# Altium schematic symbol library cp2102n-a01-gqfn24.SchLib: 1 symbol
Pins are listed as number, name and electrical type; pins without a type are passive.

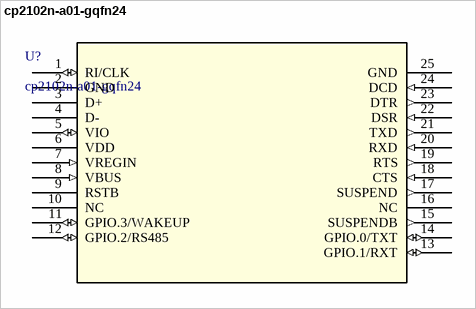
[diagram p0: symbol cp2102n-a01-gqfn24]

## cp2102n-a01-gqfn24
designator U?
No Description Available; Manufacturer_Name: Silicon Labs; Copyright: Copyright (C) 2026 Ultra Librarian. All rights reserved.; Manufacturer_Part_Number: cp2102n-a01-gqfn24; RefDes: RefDes; Type: Type
footprint QFN24_4X4
pins: 1 RI/CLK (io), 2 GND (power), 3 D+, 4 D-, 5 VIO (io), 6 VDD (power), 7 VREGIN (in), 8 VBUS (in), 9 RSTB, 10 NC, 11 GPIO.3/WAKEUP (io), 12 GPIO.2/RS485 (io), 13 GPIO.1/RXT (io), 14 GPIO.0/TXT (io), 15 SUSPENDB (out), 16 NC, 17 SUSPEND (out), 18 CTS (in), 19 RTS (out), 20 RXD (in), 21 TXD (out), 22 DSR (in), 23 DTR (out), 24 DCD (in), 25 GND (power)